# Altium schematic symbol library TJA1441AT_0Z.SchLib: 1 symbol
Pins are listed as number, name and electrical type; pins without a type are passive.

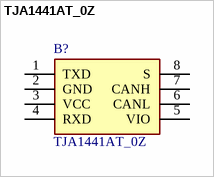
[diagram p0: symbol TJA1441AT_0Z]

## TJA1441AT_0Z
designator B?
High-speed CAN transceiver; Manufacturer_Name: NXP; Manufacturer_Part_Number: TJA1441AT/0Z; Geometry.Height: 1.75mm; Mouser Part Number: 771-TJA1441AT/0Z; Mouser Price/Stock: https://www.mouser.co.uk/ProductDetail/NXP-Semiconductors/TJA1441AT-0Z?qs=eP2BKZSCXI7fcqmlBnmIFw%3D%3D; Datasheet Link: https://www.mouser.it/datasheet/2/302/TJA1441-1949304.pdf
footprint SOIC127P600X175-8N
pins: 1 TXD, 2 GND, 3 VCC, 4 RXD, 5 VIO, 6 CANL, 7 CANH, 8 S